# Altium footprint library FUSE_40A.PcbLib: 1 footprints
Each footprint in its own frame and in the unit in brackets; x right, y up, seen from the top. Pads: shape width x height; smd on the part's side, far side on the other; paste and mask are expansions set on the pad; w line width, h text height; cw(c..) or ccw(c..) is an arc to the next point about the centre after c.
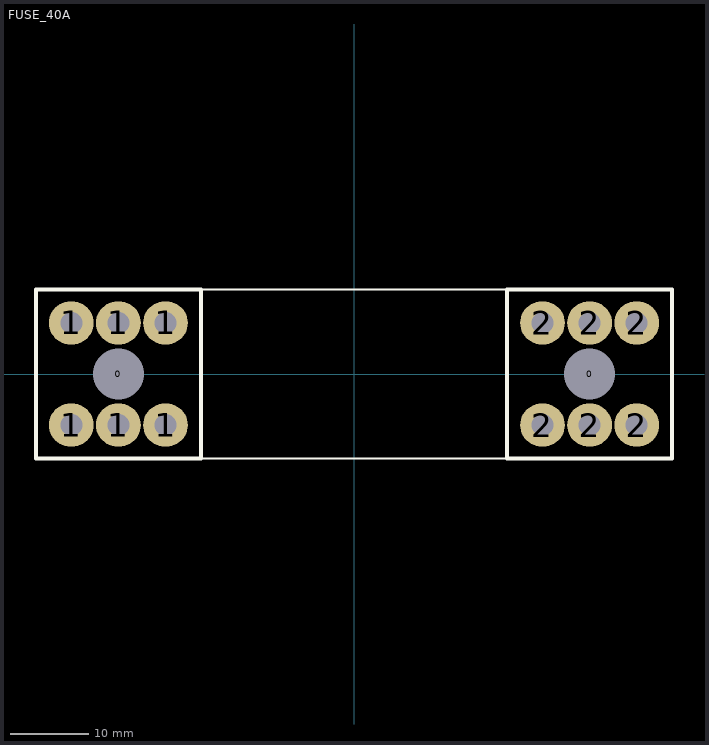
[diagram p0: the footprint, top view; thin cyan lines are the x and y axes]

## FUSE_40A [mm]
pads (14):
  round 1.524 hole 6.5: 0(-30,0) 0(30,0)
  oval 5.7x5.5 hole 2.8: 1(-36,-6.5) 1(-36,6.5) 1(-30,-6.5) 1(-30,6.5) 1(-24,-6.5) 1(-24,6.5) 2(24,-6.5) 2(24,6.5) 2(30,-6.5) 2(30,6.5) 2(36,-6.5) 2(36,6.5)
Top Overlay:
  lines w0.254: -40.513,-10.767 40.513,-10.767 40.513,10.767 -40.513,10.767 -40.513,-10.767
  lines w0.5: -40.513,-10.767 -40.513,10.767 -19.487,10.767 -19.487,-10.767 -40.513,-10.767 ; 19.487,-10.767 19.487,10.767 40.513,10.767 40.513,-10.767 19.487,-10.767
3D body "Fuse терминал.STEP": height 22.77, standoff -3.7, extent -38.8,-8.8 38.8,8.8